# EAGLE library part 6130XX11021_61303611021 (library WR-PHD)
WR-PHD 2.54 mm THT Angled Pin Header Article Properties Pins 2 unitless; 3 unitless; 4 unitless; 5 unitless; 6 unitless; 7 unitless; 8 unitless; 9 unitless; 10 unitless; 12 unitless; 14 unitless; 15 unitless; 16 unitless; 18 unitless; 22 unitless; 32 unitless; 34 unitless; 36 unitless; 40 unitless General Information Operating Temperature -40 °C up to +105 °C Pitch 2.54 mm Durability 25 Mating cycles Rows Single Gender Pin Header Type Angled Material Properties Insulator Material PA6T Insulator Flammability Rating UL94 V-0 Contact Material Copper Alloy Contact Plating Gold Contact Type Stamped Certification UL Approval E323964 Packaging Properties Packaging Bag Electrical Properties ithstanding Voltage 500 V (AC) Contact Resistance 20 mΩ RISO 1000 MΩ <https://www.we-online.com/components/media/o33210v209%20Family_WR-PHD_6130xx11021.jpg> Details see: www.we-online.com/en/components/products/PHD_2_54_THT_ANGLED_PIN_HEADER_6130XX11021 <www.we-online.com/catalog/PHD_2_54_THT_ANGLED_PIN_HEADER_6130XX11021/?utm_source=eagle_model&utm_medium=description_link&utm_campaign=eisos_eagle> Updated by Ella 2021-12-08 2021 (C) Würth Elektronik
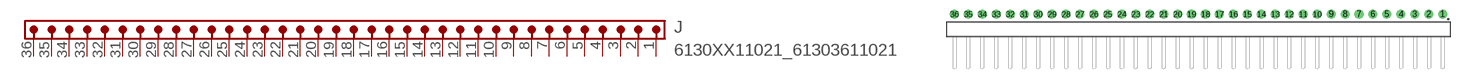
[diagram p144: symbol with the pads of 61303611021; footprint 61303611021]

Designator prefix J

## 6130XX11021_61303611021 (DATASHEET-URL: https://www.we-online.com/redexpert/spec/61303611021?ae; GENDER: Pin Header; IR: 3A; MOUNT: THT; PACKAGING: Bag; PART-NUMBER: 61303611021; PINS: 36; PITCH: 2.54 mm; ROWS: Single; TYPE: Angled; VALUE: 61303611021)  [61303611021]
1  1  pas
2  2  pas
3  3  pas
4  4  pas
5  5  pas
6  6  pas
7  7  pas
8  8  pas
9  9  pas
10  10  pas
11  11  pas
12  12  pas
13  13  pas
14  14  pas
15  15  pas
16  16  pas
17  17  pas
18  18  pas
19  19  pas
20  20  pas
21  21  pas
22  22  pas
23  23  pas
24  24  pas
25  25  pas
26  26  pas
27  27  pas
28  28  pas
29  29  pas
30  30  pas
31  31  pas
32  32  pas
33  33  pas
34  34  pas
35  35  pas
36  36  pas

## Footprint 61303611021 (pad centres in mm)
WR-PHD 2.54mm Angled Pin Header, 36 Pins
drill 1.1: 1 44.45,2.77; 2 41.91,2.77; 3 39.37,2.77; 4 36.83,2.77; 5 34.29,2.77; 6 31.75,2.77; 7 29.21,2.77; 8 26.67,2.77; 9 24.13,2.77; 10 21.59,2.77; 11 19.05,2.77; 12 16.51,2.77; 13 13.97,2.77; 14 11.43,2.77; 15 8.89,2.77; 16 6.35,2.77; 17 3.81,2.77; 18 1.27,2.77; 19 -1.27,2.77; 20 -3.81,2.77; 21 -6.35,2.77; 22 -8.89,2.77; 23 -11.43,2.77; 24 -13.97,2.77; 25 -16.51,2.77; 26 -19.05,2.77; 27 -21.59,2.77; 28 -24.13,2.77; 29 -26.67,2.77; 30 -29.21,2.77; 31 -31.75,2.77; 32 -34.29,2.77; 33 -36.83,2.77; 34 -39.37,2.77; 35 -41.91,2.77; 36 -44.45,2.77